# Altium schematic symbol library Centralize.SchLib: 1081 symbols (part 25 of 26)
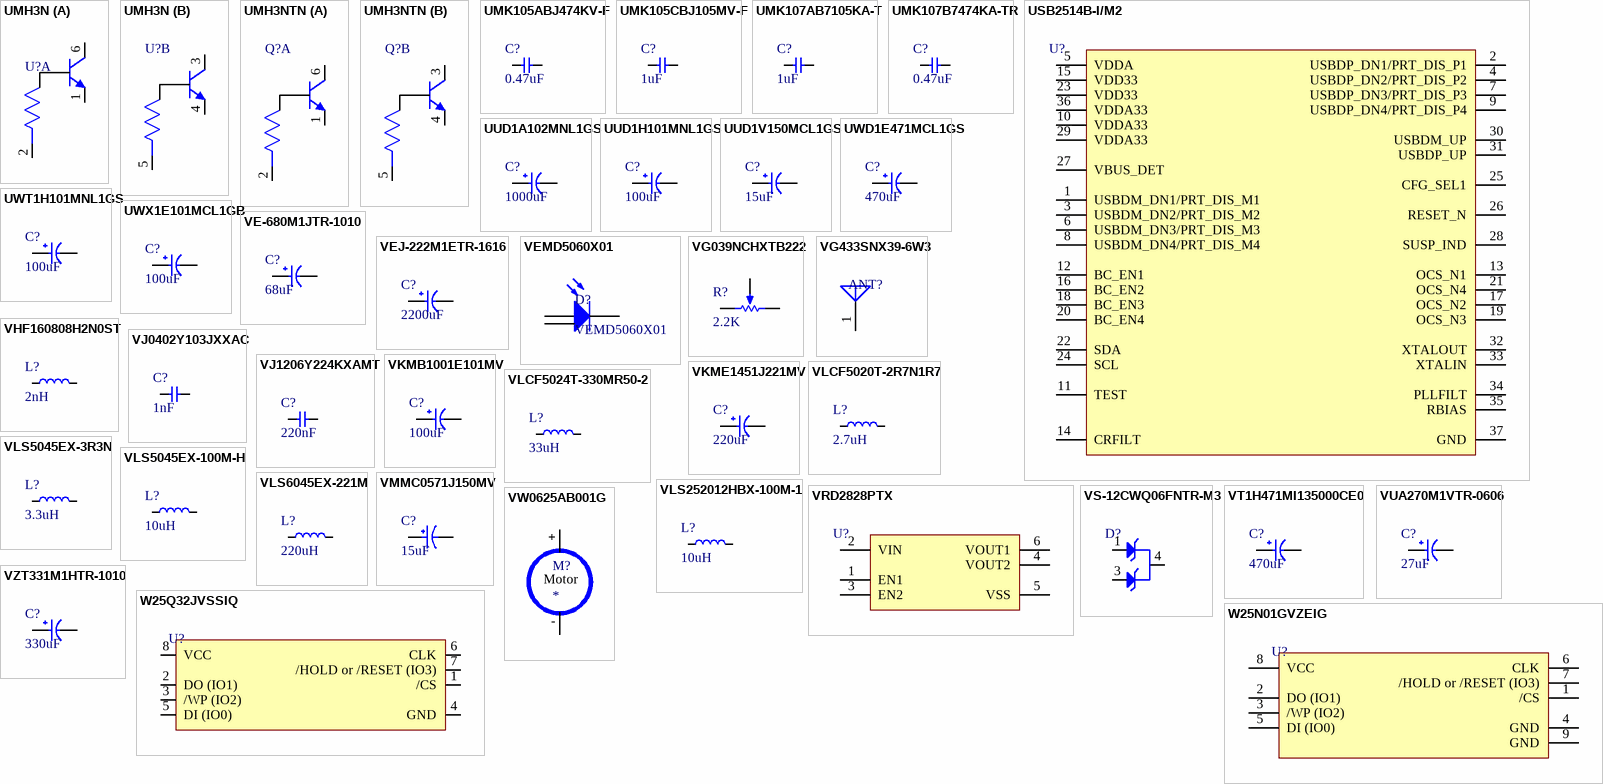
[diagram p71: symbols UMH3N to W25Q32JVSSIQ]

## VS-12CWQ06FNTR-M3
designator D?
Schottky Rectifier, 60 V, 12 A, Dual Common Cathode, TO-252AA; Manufacturer: Vishay Semiconductors; Manufacturer Part Number: VS-12CWQ06FNTR-M3; Forward Voltage: 790mV; Forward Current: 12A; Max Reverse Current: 3mA; Average Rectified Current: 6A; Max Repetitive Reverse Voltage (Vrrm): 60V; Peak Non-Repetitive Surge Current: 320A; Item Type: Rectifier Diode; Supplier 1: Avnet; RoHS: Yes; Category: Rectifier Diodes; Stock 1: 119; Pricing 1: 1=1.14000, 10=1.03000, 25=0.97800, 50=0.92000, 100=0.86500, 250=0.81400, 500=0.77000 (USD); Mount: Surface Mount; Case/Package: TO-252AA; Number of Pins: 3; Min Operating Temperature: -55°C; Max Operating Temperature: 150°C; Packaging: Tape and Reel; Element Configuration: Common Cathode; Max Forward Surge Current (Ifsm): 320A; Max Reverse Voltage (DC): 60V; Series: -; REACH SVHC: No SVHC; RoHS Compliant: Yes; ComponentLink1URL: https://datasheet.ciiva.com/8289/12cwq06f-8289149.pdf?src-supplier=Avnet; ComponentLink1Description: https://datasheet.ciiva.com/8289/12cwq06f-8289149.pdf?src-supplier=Avnet; Supplier Part Number 1: 99Y8339; LCSC Part Number: C467004
footprint TO-252AA
pins: 1 ANODE, 3 ANODE, 4 CATHODE

## VT1H471MI135000CE0
designator C?, comment 470uF
470uF ±20% 50V 12.5mm 13.5mm SMD,12.5x13.5mm; Manufacturer: Changzhou Huawei Elec; Manufacturer Part Number: VT1H471MI135000CE0; Lifetime @ Temp: 1000hrs 105℃; Item Type: Capacitor; Package: SMD,12.5x13.5mm; Capacitance: 470uF; Tolerance: ±20%; Rated Voltage: 50V; φD: 12.5mm; L: 13.5mm; Operating Temperature: -40℃~+105℃; LCSC Part Number: C191227; ComponentLink1Description: LCSC; ComponentLink1URL: https://lcsc.com/product-detail/Aluminum-Electrolytic-Capacitors-SMD_Changzhou-Huawei-Elec-VT1H471MI135000CE0_C191227.html
footprint VT1H471MI135000CE0 (470uF ±20% 50V 12.5mm 13.5mm 1000hrs 105? -40?~+105? SMD,12.5x13.5mm Aluminum Electrolytic Capacitors - SMD RoHS)
pins: 1, 2

## VUA270M1VTR-0606
designator C?, comment 27uF
27uF 35V ±20% SMD,D6.3xL5.7mm Aluminum Electrolytic Capacitors - SMD ROHS; Manufacturer: Lelon; Manufacturer Part Number: VUA270M1VTR-0606; Package: SMD,D6.3xL5.7mm; LCSC Part Number: C249807; Item Type: Capacitor; ComponentLink1Description: LCSC; ComponentLink1URL: https://www.lcsc.com/product-detail/Aluminum-Electrolytic-Capacitors-SMD_Lelon-VUA270M1VTR-0606_C249807.html
footprint VUA270M1VTR-0606
pins: 1, 2

## VW0625AB001G
designator M?
Brushless (BLDC) DC Motor Vibration, ERM 15000 RPM 3VDC; Manufacturer: Vybronics Inc; Mnaufacturer Part Number: VW0625AB001G; Item Type: Brushless DC Motor; Package: SMD, THT
footprint VW0625AB001G
pins: 1 +, 2 -
text: Motor

## VZT331M1HTR-1010
designator C?, comment 330uF
VZT Series 50 V 330 uF 105°C 10 x 10 mm SMT Aluminum Electrolytic Capacitor; Manufacturer: Surge Components; Manufacturer Part Number: VZT331M1HTR-1010S; Supplier 1: Future Electronics; RoHS: Yes; Stock 1: 35000; Pricing 1: 500=0.28000, 1500=0.27000, 2000=0.26500, 5000=0.26000, 7500=0.25000 (USD); Lead Free: Lead Free; Supplier Part Number 1: 8161943; LCSC Part Number: C249985; ComponentLink1Description: LCSC; ComponentLink1URL: https://www.lcsc.com/product-detail/Aluminum-Electrolytic-Capacitors-SMD_Lelon-VZT331M1HTR-1010_C249985.html; Item Type: Capacitor
footprint VZT-330uF-10mmDia
pins: 1, 2

## W25N01GVZEIG
designator U?
IC FLASH 1GBIT SPI/QUAD 8WSON; Manufacturer: Winbond; Manufacturer Part Number: W25N01GVZEIG; Interface: SPI,Serial; Memory Type: NAND; Density: 1Gb; Max Supply Voltage: 3.6V; Min Supply Voltage: 2.7V; Operating Supply Voltage: 3.3V; Page Size: 2Kb; Access Time: 7ns; Supplier 1: Arrow Electronics; RoHS: Yes; Category: Flash; Stock 1: 128; Pricing 1: 1=3.40000, 10=3.05600, 25=2.92700, 100=2.67700, 252=2.58500, 504=2.46500, 1008=2.40800, 2520=2.26600, 5040=2.24300 (USD); Mount: Surface Mount; Number of Pins: 8; Min Operating Temperature: -40°C; Max Operating Temperature: 85°C; RoHS Compliant: Yes; Lead Free: Lead Free; Supplier Part Number 1: W25N01GVZEIG; LCSC Part Number: C907680; Item Type: IC; ComponentLink1Description: LCSC; ComponentLink1URL: https://www.lcsc.com/product-detail/NAND-FLASH_Winbond-Elec-W25N01GVZEIG_C907680.html
footprint 8-WSON (8x6)
pins: 1 /CS, 2 DO (IO1), 3 /WP (IO2), 4 GND, 5 DI (IO0), 6 CLK, 7 /HOLD or /RESET (IO3), 8 VCC, 9 GND

## W25Q32JVSSIQ
designator U?
IC FLASH 32MBIT 133MHZ 8SOP; Manufacturer: Winbond; Manufacturer Part Number: W25Q32JVSSIQ; Memory Format: Non-Volatile,FLASH,NOR; Interface: SPI,Serial; Memory Size: 32Mb; Operating Supply Voltage: 3V; Page Size: 256B; Supplier: Arrow Electronics; Supplier Part Number: W25Q32JVSSIQ; RoHS: Yes; Category: Flash; Stock: 8474; Pricing: 1=0.6837, 25=0.5896, 100=0.5874, 500=0.5233, 5000=0.5007 (USD); Mounting Technology: Surface Mount; Case/Package: SOIC; Pins: 8; Min Operating Temperature: -40°C; Max Operating Temperature: 85°C; Packaging: Rail/Tube; Frequency: 133MHz; Series: SpiFlash®; Density: 32Mb; RoHS Compliant: Yes; ComponentLink1URL: http://www.winbond.com/resource-files/w25q32jv%20revg%2003272018%20plus.pdf?src-supplier=Digi-Key; ComponentLink1Description: http://www.winbond.com/resource-files/w25q32jv%20revg%2003272018%20plus.pdf?src-supplier=Digi-Key; ComponentLink2URL: https://www.winbond.com/hq/product/code-storage-flash-memory/serial-nor-flash/?__locale=en&partNo=W25Q32JV&src-supplier=Avnet; ComponentLink2Description: https://www.winbond.com/hq/product/code-storage-flash-memory/serial-nor-flash/?__locale=en&partNo=W25Q32JV&src-supplier=Avnet; LCSC Part Number: C82344; Item Type: IC
footprint SOIC-8 (208 mil)
pins: 1 /CS, 2 DO (IO1), 3 /WP (IO2), 4 GND, 5 DI (IO0), 6 CLK, 7 /HOLD or /RESET (IO3), 8 VCC

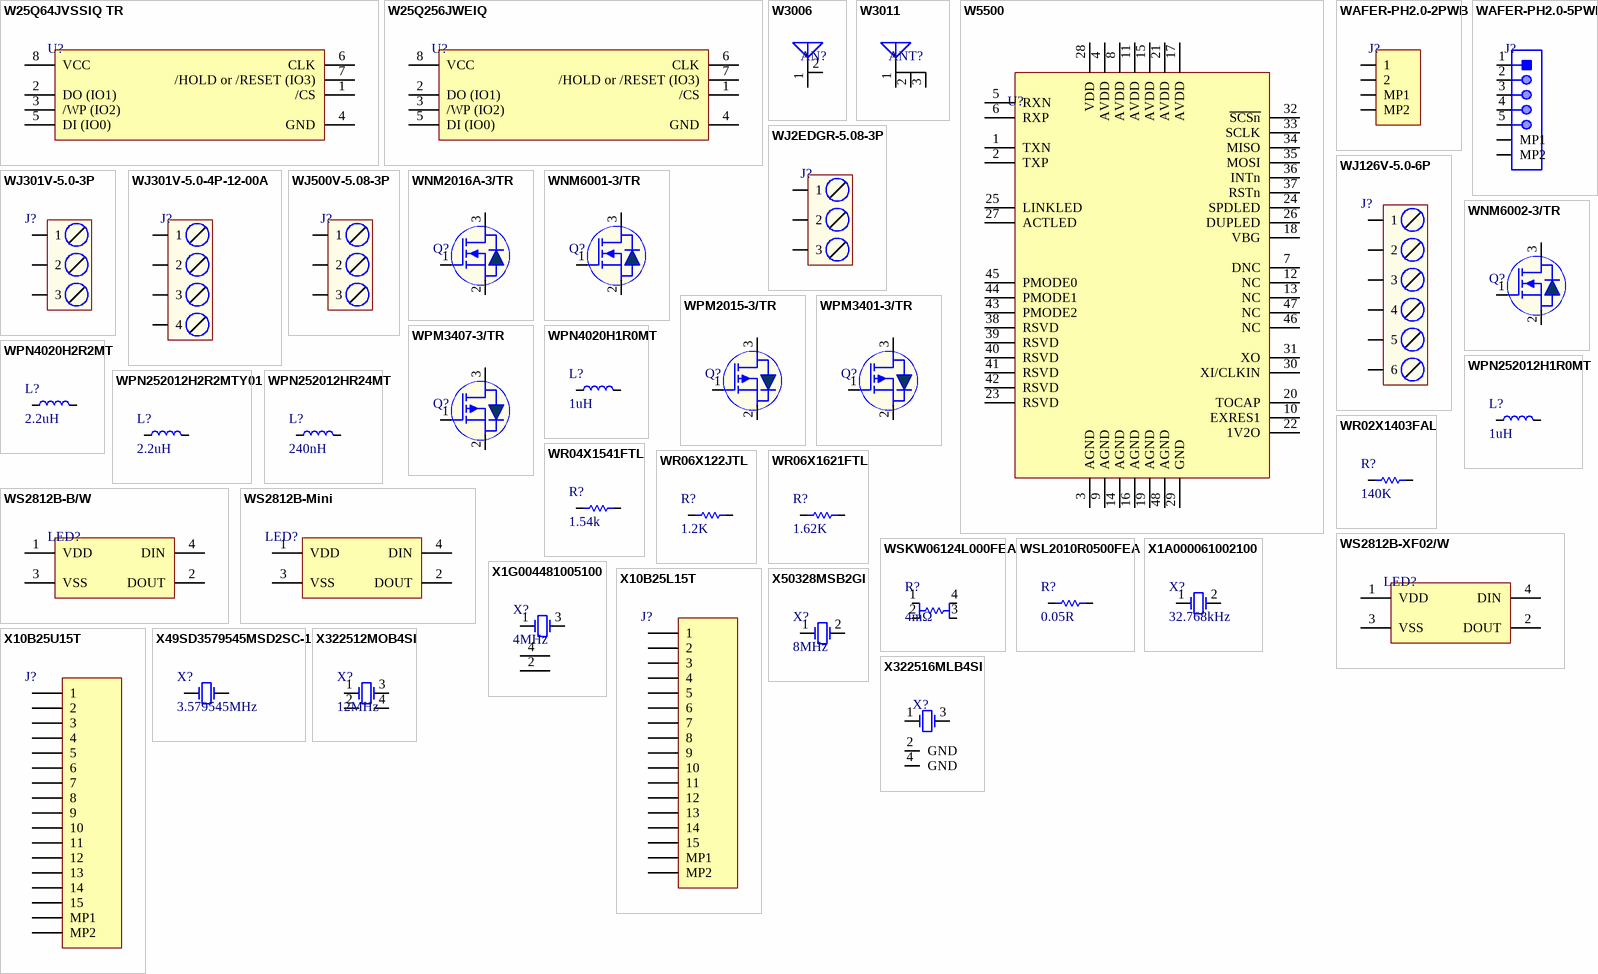
[diagram p45: symbols W25Q64JVSSIQ TR to X322516MLB4SI]

## W25Q64JVSSIQ TR
designator U?
IC FLASH 64M SPI 133MHZ 8SOIC; Manufacturer: Winbond; Manufacturer Part Number: W25Q64JVSSIQ TR; Memory Format: FLASH,NOR; Interface: SPI,Serial; Supplier 1: Arrow Electronics; RoHS: Yes; Category: Memory; Stock 1: 56000; Pricing 1: 2000=0.8199, 4000=0.7715, 6000=0.7637, 10000=0.7635 (USD); Case/Package: SOIC; Min Operating Temperature: -40°C; Max Operating Temperature: 85°C; Packaging: Tape and Reel; Series: SpiFlash®; ComponentLink1URL: http://www.winbond.com/resource-files/w25q64jv%20spi%20%20%20revc%2006032016%20kms.pdf?src-supplier=Digi-Key; ComponentLink1Description: http://www.winbond.com/resource-files/w25q64jv%20spi%20%20%20revc%2006032016%20kms.pdf?src-supplier=Digi-Key; ComponentLink2URL: http://www.winbond.com/resource-files/w25q64jv%20revj%2003272018%20plus.pdf?src-supplier=Digi-Key; ComponentLink2Description: http://www.winbond.com/resource-files/w25q64jv%20revj%2003272018%20plus.pdf?src-supplier=Digi-Key; Supplier Part Number 1: W25Q64JVSSIQ TR; LCSC Part Number: C179171; Item Type: IC
footprint SOIC-8 (208 mil)
pins: 1 /CS, 2 DO (IO1), 3 /WP (IO2), 4 GND, 5 DI (IO0), 6 CLK, 7 /HOLD or /RESET (IO3), 8 VCC

## W25Q256JWEIQ
designator U?
IC FLASH 256MBIT SPI/QUAD 8WSON; Manufacturer: Winbond; Manufacturer Part Number: W25Q256JWEIQ; Supplier 1: Arrow Electronics; RoHS: Yes; Category: Memory; RoHS Compliant: Yes; Supplier Part Number 1: W25Q256JWEIQ; ComponentLink1Description: LCSC; ComponentLink1URL: https://www.lcsc.com/product-detail/NOR-FLASH_Winbond-Elec-W25Q256JWEIQ_C2980994.html; LCSC Part Number: C2980994; Item Type: IC
footprint 8-WSON 6x5-mm
pins: 1 /CS, 2 DO (IO1), 3 /WP (IO2), 4 GND, 5 DI (IO0), 6 CLK, 7 /HOLD or /RESET (IO3), 8 VCC

## W3006
designator AN?
RF ANT 2.4GHZ/5.5GHZ CHIP SLD; Manufacturer: Pulse; Manufacturer Part Number: W3006; Number of Bands: 2; Return Loss: -10dB; Frequency: 5GHz; Impedance: 50R; Max Frequency: 5.85GHz; Min Frequency: 2.4GHz; Item Type: Antenna; Supplier 1: Arrow Electronics; RoHS: Yes; Category: RF Antennas; Stock 1: 3000; Pricing 1: 1000=1.00560, 2000=0.97680 (USD); Mount: Surface Mount; Case/Package: SMD/SMT; Number of Pins: 2; Contact Plating: Tin,Matte; Min Operating Temperature: -40°C; Max Operating Temperature: 85°C; Termination: Solder; Packaging: Bulk; Package Quantity: 1; Series: -; Length: 10mm; Width: 3.2mm; Height: 0.059inch; Radiation Hardening: No; RoHS Compliant: Yes; ComponentLink1URL: https://datasheet.ciiva.com/2792/+w3006-2792242.pdf?src-supplier=Digi-Key; ComponentLink1Description: https://datasheet.ciiva.com/2792/+w3006-2792242.pdf?src-supplier=Digi-Key; ComponentLink2URL: https://datasheet.ciiva.com/4432/w3006-203400-4432372.pdf?src-supplier=Mouser; ComponentLink2Description: https://datasheet.ciiva.com/4432/w3006-203400-4432372.pdf?src-supplier=Mouser; ComponentLink3URL: https://datasheet.ciiva.com/2792/+w3006-2792243.pdf?src-supplier=Digi-Key; ComponentLink3Description: https://datasheet.ciiva.com/2792/+w3006-2792243.pdf?src-supplier=Digi-Key; ComponentLink4URL: https://datasheet.ciiva.com/2792/+w3006-2792244.pdf?src-supplier=Digi-Key; ComponentLink4Description: https://datasheet.ciiva.com/2792/+w3006-2792244.pdf?src-supplier=Digi-Key; ComponentLink5URL: https://datasheet.ciiva.com/8152/antennas-g00302-8152982.pdf?src-supplier=Avnet; ComponentLink5Description: https://datasheet.ciiva.com/8152/antennas-g00302-8152982.pdf?src-supplier=Avnet; Supplier Part Number 1: W3006
footprint W3006_
pins: 1 FEED , 2 Support Pad

## W3011
designator ANT?
RF ANT 1.575GHZ CHIP SOLDER SMD; Manufacturer: Pulse; Manufacturer Part Number: W3011; Item Type: Antenna; Frequency: 1.57542GHz; Impedance: 50R; Number of Bands: 1; Return Loss: -12dB; Clock Frequency: 1.58542GHz; Min Frequency: 1.56542GHz; Supplier 1: Digi-Key; RoHS: Yes; Category: RF Antennas; Stock 1: 9327; Pricing 1: 1=1.59, 10=1.431, 25=1.35, 100=1.1502, 250=1.08, 500=0.945, 1000=0.783 (USD); Mounting Technology: Surface Mount,PCB; Package Quantity: 3000; Termination: Solder; Packaging: Cut Tape; Series: -; Height: 0.043inch; RoHS Compliant: Yes; Lead Free: Lead Free; ComponentLink1URL: https://datasheet.ciiva.com/8152/+w3011-w3011a-8152997.pdf?src-supplier=Avnet; ComponentLink1Description: https://datasheet.ciiva.com/8152/+w3011-w3011a-8152997.pdf?src-supplier=Avnet; ComponentLink2URL: https://datasheet.ciiva.com/2792/+w3011-w3011a-2792615.pdf?src-supplier=Digi-Key; ComponentLink2Description: https://datasheet.ciiva.com/2792/+w3011-w3011a-2792615.pdf?src-supplier=Digi-Key; Supplier Part Number 1: 553-2582-1-ND
footprint W3011
pins: 1 FEED , 2 GND, 3 GND

## W5500
designator U?
SPI LQFP-48(7x7) Ethernet ICs ROHS; Manufacturer: WIZNET; Manufacturer Part Number: W5500; Item Type: IC; LCSC Part Number: C32843; Package: LQFP-48(7x7); ComponentLink1Description: LCSC; ComponentLink1URL: https://www.lcsc.com/product-detail/Ethernet-ICs_WIZNET-W5500_C32843.html
footprint 48-LQFP (7x7)_
pins: 1 TXN, 2 TXP, 3 AGND, 4 AVDD, 5 RXN, 6 RXP, 7 DNC, 8 AVDD, 9 AGND, 10 EXRES1, 11 AVDD, 12 NC, 13 NC, 14 AGND, 15 AVDD, 16 AGND, 17 AVDD, 18 VBG, 19 AGND, 20 TOCAP, 21 AVDD, 22 1V2O, 23 RSVD, 24 SPDLED, 25 LINKLED, 26 DUPLED, 27 ACTLED, 28 VDD, 29 GND, 30 XI/CLKIN, 31 XO, 32 ~{SCSn}, 33 SCLK, 34 MISO, 35 MOSI, 36 INTn, 37 RSTn, 38 RSVD, 39 RSVD, 40 RSVD, 41 RSVD, 42 RSVD, 43 PMODE2, 44 PMODE1, 45 PMODE0, 46 NC, 47 NC, 48 AGND

## WAFER-PH2.0-2PWB
designator J?
1x2P 1 2mm Male pin 2 -25℃~+85℃ 2A Surface Mount SMD,P=2mm Wire To Board / Wire To Wire Connector ROHS; Manufacturer: XUNPU; Manufacturer Part Number: WAFER-PH2.0-2PWB; Item Type: Right Angle JST; Package: SMD,P=2mm; LCSC Part Number: C3029440; ComponentLink1Description: LCSC; ComponentLink1URL: https://www.lcsc.com/product-detail/Wire-To-Board-Wire-To-Wire-Connector_XUNPU-WAFER-PH2-0-2PWB_C3029440.html
footprint WAFER-PH2.0-2PWB
pins: 1, 2, MP1, MP2

## WAFER-PH2.0-5PWB
designator J?
1x5P 1 2mm Male pin 5 -25℃~+85℃ 2A Surface Mount SMD,P=2mm Wire To Board / Wire To Wire Connector ROHS; Manufacturer: XUNPU; Manufacturer Part Number: WAFER-PH2.0-5PWB; Item Type: Wire To Board Connector; Package: SMD,P=2mm; LCSC Part Number: C3029443; ComponentLink1Description: LCSC; ComponentLink1URL: https://www.lcsc.com/product-detail/Wire-To-Board-Wire-To-Wire-Connector_XUNPU-WAFER-PH2-0-5PWB_C3029443.html
footprint WAFER-PH2.0-5PWB
pins: 1, 2, 3, 4, 5, MP1, MP2

## WJ2EDGR-5.08-3P
designator J?
3 Bend 1 5.08mm Green Board Edge/Receptacle-Open Push-Pull,P=5.08mm Pluggable System Terminal Block ROHS; Manufacturer: Ningbo Kangnex Elec; Manufacturer Part Number: WJ2EDGR-5.08-3P; Package: Push-Pull,P=5.08mm; LCSC Part Number: C70914; Item Type: Terminal Block; ComponentLink1Description: LCSC; ComponentLink1URL: https://www.lcsc.com/product-detail/Pluggable-System-span-style-background-color-ff0-Terminal-span-Block_Ningbo-Kangnex-Elec-WJ2EDGR-5-08-3P_C70914.html
footprint WJ2EDGR-5.08-3P_
pins: 1, 2, 3

## WJ126V-5.0-6P
designator J?
P=5.0mm Screw terminal ROHS; Manufacturer: Ningbo Kangnex Elec; Manufacturer Part Number: WJ126V-5.0-6P; Item Type: Terminal Block; Package: Custom; ComponentLink1Description: LCSC; ComponentLink1URL: https://www.lcsc.com/product-detail/Screw-span-style-background-color-ff0-terminal-span_Ningbo-Kangnex-Elec-WJ126V-5-0-6P_C8379.html; LCSC Part Number: C8379
footprint WJ126V-5.0-6P_
pins: 1, 2, 3, 4, 5, 6

## WJ301V-5.0-3P
designator J?
P=5.0mm Screw terminal RoHS; Manufacturer: Ningbo Kangnex Elec; Manufacturer Part Number: WJ301V-5.0-3P; Item Type: Terminal Block; Package: Custom; LCSC Part Number: C8483; ComponentLink1Description: LCSC; ComponentLink1URL: https://www.lcsc.com/product-detail/Screw-terminal_Ningbo-Kangnex-Elec-WJ301V-5-0-3P_C8483.html
footprint WJ301V-5.0-3P
pins: 1, 2, 3

## WJ301V-5.0-4P-12-00A
designator J?
Plugin,P=5mm Screw terminal ROHS; Manufacturer: Ningbo Kangnex Elec; Manufacturer Part Number: WJ301V-5.0-4P-12-00A; Item Type: Terminal Block; Package: Plugin,P=5mm; LCSC Part Number: C3031442; ComponentLink1Description: LCSC; ComponentLink1URL: https://www.lcsc.com/product-detail/Screw-terminal_Ningbo-Kangnex-Elec-WJ301V-5-0-4P-12-00A_C3031442.html
footprint WJ301V-5.0-4P-12-00A
pins: 1, 2, 3, 4

## WJ500V-5.08-3P
designator J?
1x3P 18A -40℃~+105℃ 250V Green 14~30 Straight pin 5.08mm 2.5 1 3 Plugin,P=5.08mm Screw terminal ROHS; Manufacturer: Ningbo Kangnex Elec; Manufacturer Part Number: WJ500V-5.08-3P; Item Type: Terminal Block; Package: Plugin,P=5.08mm; LCSC Part Number: C72334; ComponentLink1Description: LCSC; ComponentLink1URL: https://www.lcsc.com/product-detail/Screw-terminal_Ningbo-Kangnex-Elec-WJ500V-5-08-3P_C72334.html
footprint WJ500V-5.08-3P
pins: 1, 2, 3

## WNM2016A-3/TR
designator Q?
Single N-Channel, 20V, 4.7A, Power MOSFET; Manufacturer: WILLSEMI; Manufacturer Part Number: WNM2016A-3/TR; Footprint: SOT-23-3; ComponentLink1Description: LCSC; ComponentLink1URL: https://www.lcsc.com/product-detail/MOSFETs_WILLSEMI-Will-Semicon-WNM2016A-3-TR_C601105.html; LCSC Part Number: C601105; Item Type: Mosfet
footprint sot-23
pins: 1 G, 2 S, 3 D

## WNM6001-3/TR
designator Q?
60V 500mA 690mW 2Ω@10V,500mA 2V@250uA N Channel SOT-23 MOSFETs ROHS; Manufacturer: WILLSEMI; Manufacturer Part Number: WNM6001-3/TR; Item Type: Mosfet; ComponentLink1Description: LCSC; ComponentLink1URL: https://www.lcsc.com/product-detail/MOSFETs_WILLSEMI-Will-Semicon-WNM6001-3-TR_C239589.html; Footprint: SOT-23; LCSC Part Number: C239589
footprint SOT-23 (TRANS NPN 40V 0.6A SOT23)
pins: 1 G, 2 S, 3 D

## WNM6002-3/TR
designator Q?
60V 300mA 2Ω@10V,370mA 370mW 2V@250uA N Channel SOT-323 MOSFETs ROHS; Manufacturer: WILLSEMI; Manufacturer Part Number: WNM6002-3/TR; Item Type: Mosfet; ComponentLink1Description: LCSC; ComponentLink1URL: https://www.lcsc.com/product-detail/MOSFETs_WILLSEMI-Will-Semicon-WNM6002-3-TR_C501342.html; Package: SOT-323; LCSC Part Number: C501342
footprint SOT_323
pins: 1 G, 2 S, 3 D

## WPM2015-3/TR
designator Q?
20V 2.2A 800mW 110mΩ@4.5V,2.7A 810mV@250uA P Channel SOT-23 MOSFETs ROHS; Manufacturer: WILLSEMI; Manufacturer Part Number: WPM2015-3/TR; Item Type: Mosfet; Package: SOT-23; LCSC Part Number: C213159; ComponentLink1Description: LCSC; ComponentLink1URL: https://www.lcsc.com/product-detail/MOSFETs_WILLSEMI-Will-Semicon-WPM2015-3-TR_C213159.html
footprint Sot-23 (TRANS NPN 40V 0.6A SOT23)
pins: 1 G, 2 S, 3 D

## WPM3401-3/TR
designator Q?
30V 4.6A 38mΩ@10V,4.3A 1.3W 1V@250uA 90pF@15V P Channel 1.25nF@15V 24.8nC@10V +150℃@(Tj) SOT-23-3L MOSFETs ROHS; Manufacturer: WILLSEMI; Manufacturer Part Number: WPM3401-3/TR; Item Type: Mosfet; Footprint: SOT-23-3L; ComponentLink1Description: LCSC; ComponentLink1URL: https://www.lcsc.com/product-detail/MOSFETs_WILLSEMI-Will-Semicon-WPM3401-3-TR_C506235.html; LCSC Part Number: C506235
footprint SOT-23-3L_
pins: 1 G, 2 S, 3 D

## WPM3407-3/TR
designator Q?
30V 3.7A 46mΩ@10V,4.4A 1W 3V@250uA P Channel SOT-23(SOT-23-3) MOSFETs ROHS; Manufacturer Part Number: WPM3407-3/TR; Manufacturer: WILLSEMI; Item Type: Mosfet; Package: SOT-23; LCSC Part Number: C167139; ComponentLink1Description: LCSC; ComponentLink1URL: https://www.lcsc.com/product-detail/MOSFETs_WILLSEMI-Will-Semicon-WPM3407-3-TR_C167139.html
footprint Sot-23 (TRANS NPN 40V 0.6A SOT23)
pins: 1 G, 2 S, 3 D

## WPN4020H1R0MT
designator L?, comment 1uH
FIXED IND 1UH 5.8A 26 MOHM SMD; Manufacturer: Sunlord; Manufacturer Part Number: WPN4020H1R0MT; Item Type: Inductor; Supplier 1: Digi-Key; RoHS: Yes; Category: Fixed Inductors; Supplier Part Number 1: 3442-WPN4020H1R0MTTR-ND; LCSC Part Number: C98359; ComponentLink1Description: LCSC; ComponentLink1URL: https://www.lcsc.com/product-detail/Power-Inductors_Sunlord-WPN4020H1R0MT_C98359.html
footprint WPN4020H1R0MT_
pins: 1, 2

## WPN4020H2R2MT
designator L?, comment 2.2uH
Fixed Ind 2.2UH 4.3A 48MOHM SMD; Manufacturer: Sunlord; Manufacturer Part Number: WPN4020H2R2MT; Item Type: Inductor; Supplier 1: Digi-Key; RoHS: No; Stock 1: 1762; Pricing 1: 1=0.84000, 10=0.73500, 25=0.68240, 50=0.57760, 100=0.52500, 250=0.49352, 500=0.44100, 1000=0.35700 (USD); Supplier Part Number 1: 3442-WPN4020H2R2MTCT-ND; LCSC Part Number: C98361; ComponentLink1Description: LCSC; ComponentLink1URL: https://www.lcsc.com/product-detail/Power-Inductors_Sunlord-WPN4020H2R2MT_C98361.html
footprint WPN4020H2R2MT_ ((4.00mm x 4.00mm))
pins: 1, 2

## WPN252012H1R0MT
designator L?, comment 1uH
FIXED IND 1UH 3A 54 MOHM SMD; Manufacturer: Sunlord; Manufacturer Part Number: WPN252012H1R0MT; Item Type: Inductor; Supplier 1: Digi-Key; RoHS: Yes; Category: Fixed Inductors; Stock 1: 4813; Pricing 1: 1=0.46000, 10=0.40400, 25=0.37520, 50=0.31760, 100=0.28880, 250=0.27144, 500=0.24256, 1000=0.19635 (USD); Supplier Part Number 1: 3442-WPN252012H1R0MTCT-ND; LCSC Part Number: C98348; ComponentLink1Description: LCSC; ComponentLink1URL: https://www.lcsc.com/product-detail/Power-Inductors_Sunlord-WPN252012H1R0MT_C98348.html
footprint WPN252012H1R0MT_
pins: 1, 2

## WPN252012H2R2MTY01
designator L?, comment 2.2uH
Fixed Ind 2.220%UH 0.085 Ohm 2700; Manufacturer: Sunlord; Manufacturer Part Number: WPN252012H2R2MTY01; Item Type: Inductor; Supplier 1: Digi-Key; RoHS: Yes; Category: Fixed Inductors; Stock 1: 1965; Pricing 1: 1=0.46000, 10=0.40400, 25=0.37520, 50=0.31760, 100=0.28880, 250=0.27144, 500=0.24256, 1000=0.19635 (USD); Supplier Part Number 1: 3442-WPN252012H2R2MTY01CT-ND; ComponentLink1Description: LCSC; ComponentLink1URL: https://www.lcsc.com/product-detail/Power-Inductors_Sunlord-WPN252012H2R2MTY01_C279858.html; LCSC Part Number: C279858
footprint Inductor 1008
pins: 1, 2

## WPN252012HR24MT
designator L?, comment 240nH
4.05A 240nH ±20% 19mΩ SMD Power Inductors ROHS; Manufacturer: Sunlord; Manufacturer Part Number: WPN252012HR24MT; Footprint: Custom; ComponentLink1Description: LCSC; ComponentLink1URL: https://www.lcsc.com/product-detail/Power-Inductors_Sunlord-WPN252012HR24MT_C305274.html; LCSC Part Number: C305274; Item Type: Inductor
footprint WPN252012HR24MT_
pins: 1, 2

## WR02X1403FAL
designator R?, comment 140K
Res 140K Ohm 1% 1/20W 0201; Manufacturer: Walsin Technologies; Manufacturer Part Number: WR02X1403FAL; Item Type: Resistor; Supplier 1: Digi-Key; RoHS: Yes; Category: Chip SMD Resistors; Pricing 1: 15000=0.00192 (USD); RoHS Compliant: Yes; Supplier Part Number 1: 1292-WR02X1403FALTR-ND; LCSC Part Number: C367500
footprint Res-0201
pins: 1, 2

## WR04X1541FTL
designator R?, comment 1.54k
62.5mW Thick Film Resistors ±1% 1.54kΩ 0402 Chip Resistor - Surface Mount ROHS; Manufacturer: Walsin Tech Corp; Manufacturer Part Number: WR04X1541FTL; LCSC Part Number: C396136; Package: 0402; Item Type: Resistor; ComponentLink1Description: LCSC; ComponentLink1URL: https://www.lcsc.com/product-detail/Chip-Resistor-Surface-Mount_Walsin-Tech-Corp-WR04X1541FTL_C396136.html
footprint Res-0402
pins: 1, 2

## WR06X122JTL
designator R?, comment 1.2K
RES 1.2K OHM 5% 1/10W 0603; Manufacturer: Walsin Technologies; Manufacturer Part Number: WR06X122JTL; Power Rating: 100mW; Voltage Rating (DC): 75V; Resistance: 1200R; Item Type: Resistor; Supplier 1: Arrow Electronics; RoHS: Yes; Category: Resistors; Stock 1: 545000; Pricing 1: 5000=0.00640, 10000=0.00630, 25000=0.00620, 50000=0.00610 (USD); Case/Package: Molded; Contact Material: Tin; Packaging: Tape and Reel; Tolerance: 5%; Lead Free: Lead Free; RoHS Compliant: Yes; ComponentLink1URL: http://www.farnell.com/datasheets/1960319.pdf?src-supplier=Farnell; ComponentLink1Description: http://www.farnell.com/datasheets/1960319.pdf?src-supplier=Farnell; ComponentLink2URL: https://www.verical.com/server-webapp/html/getDatasheet?partID=752938&src-supplier=Verical; ComponentLink2Description: https://www.verical.com/server-webapp/html/getDatasheet?partID=752938&src-supplier=Verical; Supplier Part Number 1: WR06X122 JTL; LCSC Part Number: C168366
footprint Res-0603
pins: 1, 2

## WR06X1621FTL
designator R?, comment 1.62K
RES 1.62K OHM 1% 1/10W 0603; Manufacturer: Walsin Technologies; Manufacturer Part Number: WR06X1621FTL; Power Rating: 100mW; Resistance: 1.62kR; Item Type: Resistor; Supplier 1: Arrow Electronics; RoHS: Yes; Category: Chip SMD Resistors; Stock 1: 145000; Pricing 1: 5000=0.00100 (USD); Case/Package: Molded; Contact Material: Tin; Lead Free: Lead Free; RoHS Compliant: Yes; Supplier Part Number 1: WR06X1621FTL; LCSC Part Number: C170482; ComponentLink1Description: LCSC; ComponentLink1URL: https://www.lcsc.com/product-detail/Chip-Resistor-Surface-Mount_Walsin-Tech-Corp-WR06X1621FTL_C170482.html
footprint Res-0603
pins: 1, 2

## WS2812B-B/W
designator LED?
RGB SMD5050 Light Emitting Diodes (LED) ROHS; Manufacturer: Worldsemi; Manufacturer Part Number: WS2812B-B/W; Item Type: RGB LED; Package: SMD5050; LCSC Part Number: C114586; ComponentLink1Description: LCSC; ComponentLink1URL: https://www.lcsc.com/product-detail/Light-Emitting-Diodes-LED_Worldsemi-WS2812B-B-W_C114586.html
footprint WS2812B-B/W
pins: 1 VDD, 2 DOUT, 3 VSS, 4 DIN

## WS2812B-Mini
designator LED?
SMD,3.5x3.5mm Light Emitting Diodes (LED) RoHS; Manufacturer: Worldsemi; Manufacturer Part Number: WS2812B-Mini; Item Type: RGB LED; ComponentLink1Description: LCSC; ComponentLink1URL: *https://lcsc.com/product-detail/Light-Emitting-Diodes-LED_Worldsemi-WS2812B-Mini_C527089.html; Package: SMD,3.5x3.5mm; LCSC Part Number: C527089
footprint WS2812B-Mini (SMD,3.5x3.5mm Light Emitting Diodes (LED) RoHS)
pins: 1 VDD, 2 DOUT, 3 VSS, 4 DIN

## WS2812B-XF02/W
designator LED?
SMD5050 Light Emitting Diodes (LED) ROHS; Manufacturer: Worldsemi; Manufacturer Part Number: WS2812B-XF02/W; Item Type: RGB LED; Package: SMD5050; LCSC Part Number: C4154882; ComponentLink1Description: LCSC; ComponentLink1URL: https://www.lcsc.com/product-detail/Light-Emitting-Diodes-LED_Worldsemi-WS2812B-XF02-W_C4154882.html
footprint WS2812B-XF02/W
pins: 1 VDD, 2 DOUT, 3 VSS, 4 DIN

## WSKW06124L000FEA
designator R?, comment 4mΩ
1W ±75ppm/℃ ±1% 4mΩ -65℃~+170℃ 0612 Chip Resistor - Surface Mount ROHS; Manufacturer: Vishay; Manufacturer Part Number: WSKW06124L000FEA; Supplier 1: Digi-Key; RoHS: Yes; Category: Chip SMD Resistors; Supplier Part Number 1: 541-WSKW06124L000FEACT-ND; LCSC Part Number: C4017878; Item Type: Resistor; ComponentLink1Description: LCSC; ComponentLink1URL: https://lcsc.com/product-detail/Chip-Resistor-Surface-Mount_Vishay-Intertech-WSKW06124L000FEA_C4017878.html
footprint Res 0612
pins: 1, 2, 3, 4

## WSL2010R0500FEA
designator R?, comment 0.05R
RES 0.05 OHM 1% 1/2W 2010; Manufacturer: Vishay Dale; Manufacturer Part Number: WSL2010R0500FEA; Temperature Coefficient: 75ppm/°C; Resistance: 50mR; Power Rating: 500mW; Voltage Rating: 150mV; Item Type: Resistor; Supplier 1: Digi-Key; RoHS: No; Category: Chip SMD Resistors; Stock 1: 20000; Pricing 1: 1=0.92000, 10=0.81400, 25=0.74800, 50=0.68240, 100=0.59060, 250=0.49876, 500=0.42000, 1000=0.35000 (USD); Mount: Surface Mount; Case/Package: 2010; Number of Pins: 2; Contact Plating: Tin,Matte; Weight: 0.001372oz; Case Code (Metric): 5025; Case Code (Imperial): 2010; Min Operating Temperature: -65°C; Max Operating Temperature: 170°C; Resistor Type: Metal Element,Metal Strip; Tolerance: 1%; Features: Moisture Resistant; Number of Terminations: 2; Termination: SMD/SMT; Max Power Dissipation: 500mW; Package Quantity: 1; Packaging: Tape and Reel; Length: 5.08mm; Width: 0.1inch; Height: 0.635mm; Depth: 2.54mm; Radiation Hardening: No; REACH SVHC: No SVHC; Military Standard: Not; Lead Free: Lead Free; ComponentLink1URL: https://datasheet.ciiva.com/2483/wsl-2483729.pdf?src-supplier=Digi-Key; ComponentLink1Description: https://datasheet.ciiva.com/2483/wsl-2483729.pdf?src-supplier=Digi-Key; ComponentLink2URL: https://datasheet.ciiva.com/2483/wsl-2483730.pdf?src-supplier=Digi-Key; ComponentLink2Description: https://datasheet.ciiva.com/2483/wsl-2483730.pdf?src-supplier=Digi-Key; ComponentLink3URL: https://datasheet.ciiva.com/2483/wsl-2483731.pdf?src-supplier=Digi-Key; ComponentLink3Description: https://datasheet.ciiva.com/2483/wsl-2483731.pdf?src-supplier=Digi-Key; ComponentLink4URL: https://datasheet.ciiva.com/7695/wsl-7695158.pdf?src-supplier=Element14; ComponentLink4Description: https://datasheet.ciiva.com/7695/wsl-7695158.pdf?src-supplier=Element14; ComponentLink5URL: https://datasheet.ciiva.com/16215/wsl-16215947.pdf?src-supplier=Future+Electronics; ComponentLink5Description: https://datasheet.ciiva.com/16215/wsl-16215947.pdf?src-supplier=Future+Electronics; ComponentLink6URL: https://datasheet.ciiva.com/17177/wsl-17177243.pdf?src-supplier=Avnet+Europe; ComponentLink6Description: https://datasheet.ciiva.com/17177/wsl-17177243.pdf?src-supplier=Avnet+Europe; ComponentLink7URL: https://datasheet.ciiva.com/28621/1911169-28621837.pdf?src-supplier=Element14; ComponentLink7Description: https://datasheet.ciiva.com/28621/1911169-28621837.pdf?src-supplier=Element14; ComponentLink8URL: https://datasheet.ciiva.com/36857/442550-36857725.pdf?src-supplier=Element14; ComponentLink8Description: https://datasheet.ciiva.com/36857/442550-36857725.pdf?src-supplier=Element14; Supplier Part Number 1: WSLE-.05CT-ND; LCSC Part Number: C844689
footprint RES-2010
pins: 1, 2

## X1A000061002100
designator X?, comment 32.768kHz
32.768kHz SMD Crystal Resonator 6pF 90kΩ ±20ppm -40℃~+85℃ SMD2012-2P Crystals ROHS; Manufacturer Part Number: X1A000061002100; Manufacturer: Seiko Epson; ComponentLink1Description: LCSC; ComponentLink1URL: https://www.lcsc.com/product-detail/Crystals_Seiko-Epson-X1A000061002100_C255767.html; Value: 32.768kHz; LCSC Part Number: C255767; Item Type: Crystal
footprint X1A000061002100_
pins: 1 OSC1, 2 OSC2

## X1G004481005100
designator X?, comment 4MHz
4MHz ±100ppm 3mA 1.6V ~ 3.6V SMD7050-4P Oscillators ROHS; Manufacturer: Seiko; Manufacturer Part Number: X1G004481005100; Item Type: Crystal; Package: Custom; ComponentLink1Description: LCSC; ComponentLink1URL: https://lcsc.com/product-detail/Oscillators_Seiko-Epson-X1G004481005100_C70511.html; LCSC Part Number: C70511
footprint X1G004481005100_
pins: 1 OSC1, 2 GND, 3 OSC2, 4 VCC

## X10B25L15T
designator J?
Slide Lock 15 Bottom Contact Surface Mount 1mm 260℃ SMD,P=1mm FFC/FPC Connectors ROHS; Manufacturer: XKB Connectivity; Manufacturer Part Number: X10B25L15T; Item Type: FFC Connector; Package: Custom; LCSC Part Number: C500174; ComponentLink1Description: LCSC; ComponentLink1URL: https://www.lcsc.com/product-detail/FFC-FPC-Connectors_XKB-Connectivity-X10B25L15T_C500174.html
footprint X10B25L15T_
pins: 1, 2, 3, 4, 5, 6, 7, 8, 9, 10, 11, 12, 13, 14, 15, MP1, MP2

## X10B25U15T
designator J?
Contact,Top 15 0.039"（1.00mm） 0.098"（2.50mm） Slide Lock SMD FFC, FPC Connectors RoHS; Maunfacturer Part Number: X10B25U15T; Manufacturer: XKB Connectivity; ComponentLink1Description: LCSC; ComponentLink1URL: https://www.lcsc.com/product-detail/FFC-FPC-Connectors_XKB-Connectivity-X10B25U15T_C500193.html; LCSC Part Number: C500193; Item Type: FPC Connector
footprint X10B25U15T_
pins: 1, 2, 3, 4, 5, 6, 7, 8, 9, 10, 11, 12, 13, 14, 15, MP1, MP2

## X49SD3579545MSD2SC-1
designator X?, comment 3.579545MHz
3.579545MHz 20pF ±20ppm ±30ppm HC-49S Crystals ROHS; Manufacturer: Yangxing Tech; Manufacturer Part Number: X49SD3579545MSD2SC-1; Package: HC-49S; LCSC Part Number: C2195; Item Type: Crystal; ComponentLink1Description: LCSC; ComponentLink1URL: https://www.lcsc.com/product-detail/Crystals_Yangxing-Tech-X49SD3579545MSD2SC-1_C2195.html
footprint X49SD3579545MSD2SC-1
pins: 1 OSC1, 2 OSC2

## X50328MSB2GI
designator X?, comment 8MHz
8MHz 20pF ±10ppm ±50ppm SMD5032-2P Crystals ROHS; Manufacturer: Yangxing Tech; Manufacturer Part Number: X50328MSB2GI; Package: SMD5032-2P; LCSC Part Number: C115962; Item Type: Crystal; ComponentLink1Description: LCSC; ComponentLink1URL: https://www.lcsc.com/product-detail/Crystals_Yangxing-Tech-X50328MSB2GI_C115962.html
footprint SMD5032-2P
pins: 1 OSC1, 2 OSC2

## X322512MOB4SI
designator X?, comment 12MHz
12MHz SMD Crystal Resonator 12pF ±10ppm ±30ppm -40℃~+85℃ SMD3225-4P Crystals ROHS; Manufacturer: Yangxing Tech; Manufacturer Part Number: X322512MOB4SI; ComponentLink1Description: LCSC; ComponentLink1URL: https://www.lcsc.com/product-detail/Crystals_Yangxing-Tech-X322512MOB4SI_C70565.html; Package: SMD3225-4P; LCSC Part Number: C70565; Item Type: Crystal
footprint X322512MOB4SI_
pins: 1, 2 GND, 3, 4 GND

## X322516MLB4SI
designator X?
16MHz SMD Crystal Resonator 9pF ±10ppm ±30ppm -40℃~+85℃ SMD3225-4P Crystals ROHS; Manufacturer: Yangxing Tech; Manufacturer Part Number: X322516MLB4SI; Package: SMD3225-4P; ComponentLink1Description: LCSC; ComponentLink1URL: https://www.lcsc.com/product-detail/Crystals_Yangxing-Tech-X322516MLB4SI_C13738.html; LCSC Part Number: C13738; Item Type: Crystal
footprint SMD3225-4P
pins: 1 CRYSTAL, 2 GND, 3 CRYSTAL, 4 GND

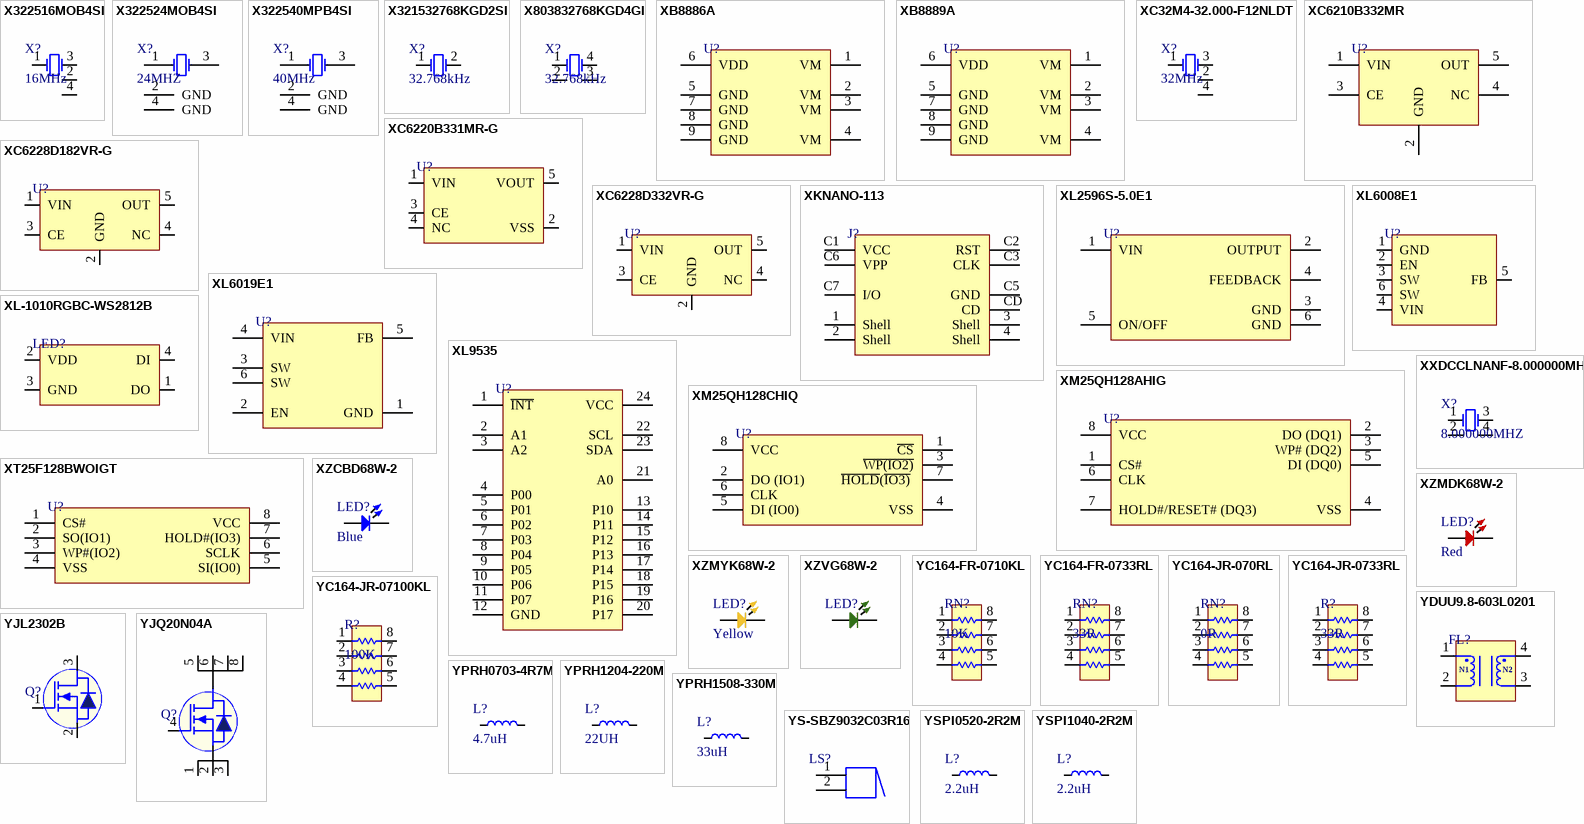
[diagram p46: symbols X322516MOB4SI to YSPI1040-2R2M]

## X322516MOB4SI
designator X?, comment 16MHz
16MHz SMD Crystal Resonator 12pF ±10ppm ±30ppm -40℃~+85℃ SMD3225-4P Crystals ROHS; Manufacturer: Yangxing Tech; Manufacturer Part Number: X322516MOB4SI; Footprint: Custom; ComponentLink1Description: LCSC; ComponentLink1URL: https://www.lcsc.com/product-detail/Crystals_Yangxing-Tech-X322516MOB4SI_C12668.html; LCSC Part Number: C12668; Item Type: Crystal
footprint X322516MOB4SI_ (16MHz SMD Crystal Resonator 12pF)
pins: 1 OSC1, 2 GND, 3 OSC2, 4 GND

## X322524MOB4SI
designator X?, comment 24MHZ
24MHz SMD Crystal Resonator 12pF ±10ppm ±30ppm -40℃~+85℃ SMD3225-4P Crystals ROHS; Manufacturer: Yangxing Tech; Manufacturer Part Number: X322524MOB4SI; ComponentLink1Description: LCSC; ComponentLink1URL: https://www.lcsc.com/product-detail/Crystals_Yangxing-Tech-X322524MOB4SI_C70590.html; Footprint: Custom; LCSC Part Number: C70590; Item Type: Crystal
footprint X322524MOB4SI-
pins: 1 CRYSTAL, 2 GND, 3 CRYSTAL, 4 GND

## X322540MPB4SI
designator X?, comment 40MHz
40MHz SMD Crystal Resonator 15pF SMD3225-4P Crystals ROHS; Manufacturer: Yangxing Tech; Manufacturer Part Number: X322540MPB4SI; Value: 40MHZ; LCSC Part Number: C9010; ComponentLink1Description: LCSC; ComponentLink1URL: https://www.lcsc.com/product-detail/Crystals_Yangxing-Tech-X322540MPB4SI_C9010.html; Item Type: Crystal
footprint X322540MPB4SI_
pins: 1 CRYSTAL, 2 GND, 3 CRYSTAL, 4 GND

## X321532768KGD2SI
designator X?, comment 32.768kHz
32.768kHz SMD Crystal Resonator 12.5pF ±20ppm -40℃~+85℃ SMD3215-2P Crystals ROHS; Manufacturer: Yangxing Tech; Manufacturer Part Number: X321532768KGD2SI; Footprint: Custom; ComponentLink1Description: LCSC; ComponentLink1URL: https://www.lcsc.com/product-detail/Crystals_Yangxing-Tech-X321532768KGD2SI_C620155.html; LCSC Part Number: C620155; Item Type: Crystal
footprint X321532768KGD2SI_
pins: 1 OSC1, 2 OSC2

## X803832768KGD4GI
designator X?, comment 32.768kHz
32.768kHz 12.5pF ±20ppm MC-306 Crystals ROHS; Manufacturer: YXC; Manufacturer Part Number: X803832768KGD4GI; Package: MC-306; LCSC Part Number: C12675; Item Type: Crystal
footprint MC-306
pins: 1 OSC1, 2 GND, 3 GND, 4 OSC2

## XB8886A
designator U?
SOIC-8-EP Battery Management ICs ROHS; Manufacturer: XySemi; Manufacturer Part Number: XB8886A; Item Type: IC; Package: SOIC-8-EP; LCSC Part Number: C669690; ComponentLink1Description: LCSC; ComponentLink1URL: https://www.lcsc.com/product-detail/Battery-Management-ICs_XySemi-XB8886A_C669690.html
footprint 8-SO-EP_
pins: 1 VM, 2 VM, 3 VM, 4 VM, 5 GND, 6 VDD, 7 GND, 8 GND, 9 GND

## XB8889A
designator U?
One Cell Lithium-ion/Polymer Battery Protection IC; Manufacturer: Xysemi; Manufacturer Part Number: XB8889A; Package: SOP 8-EPAD
footprint 8-SO-EP_
pins: 1 VM, 2 VM, 3 VM, 4 VM, 5 GND, 6 VDD, 7 GND, 8 GND, 9 GND

## XC32M4-32.000-F12NLDT
designator X?, comment 32MHz
32MHz SMD Crystal Resonator 12pF 40Ω ±10ppm ±20ppm -40℃~+85℃ SMD3225-4P Crystals ROHS; Manufacturer: HCI; Manufacturer Part Number: XC32M4-32.000-F12NLDT; Footprint: Custom; LCSC Part Number: C2905357; Item Type: Crystal; ComponentLink1Description: LCSC; ComponentLink1URL: https://www.lcsc.com/product-detail/Crystals_HCI-XC32M4-32-000-F12NLDT_C2905357.html
footprint XC32M4-32.000-F12NLDT_
pins: 1 OSC1, 2 GND, 3 OSC2, 4 GND

## XC6210B332MR
designator U?
SOT-23-5 Linear Voltage Regulators (LDO) ROHS; Manufacturer: TECH PUBLIC; Manufacturer Part Number: XC6210B332MR; Item Type: IC; Package: SOT-23-5; LCSC Part Number: C3021084; ComponentLink1Description: LCSC; ComponentLink1URL: https://www.lcsc.com/product-detail/Linear-Voltage-Regulators-LDO_TECH-PUBLIC-XC6210B332MR_C3021084.html
footprint Sot-23-5
pins: 1 VIN, 2 GND, 3 CE, 4 NC, 5 OUT

## XC6220B331MR-G
designator U?
Linear Voltage Regulator IC Positive Fixed 1 Output 3.3V 1A SOT-25; Manufacturer: Torex; Manufacturer Part Number: XC6220B331MR-G; Dropout Voltage: 655mV; Min Input Voltage: 1.6V; Max Input Voltage: 6V; Number of Regulators: 1; Min Current Limit: 1.005A; Supplier 1: Newark; RoHS: Yes; Category: Voltage Regulators - Linear; Stock 1: 3078; Pricing 1: 1=1.20000, 10=1.08000, 100=0.83900, 500=0.69300, 1000=0.54800 (USD); Mount: Surface Mount; Case/Package: SOT-25; Number of Pins: 5; Min Operating Temperature: -40°C; Max Operating Temperature: 85°C; Package Quantity: 1; Packaging: Tape and Reel; Output Current: 1A; Output Voltage: 3.3V; Nominal Output Voltage: 3.3V; Output Type: Fixed; Series: -; REACH SVHC: No SVHC; RoHS Compliant: Yes; ComponentLink1URL: https://datasheet.ciiva.com/7992/610888-7992813.pdf?src-supplier=Element14; ComponentLink1Description: https://datasheet.ciiva.com/7992/610888-7992813.pdf?src-supplier=Element14; ComponentLink2URL: https://datasheet.ciiva.com/5755/610888-5755886.pdf?src-supplier=Farnell; ComponentLink2Description: https://datasheet.ciiva.com/5755/610888-5755886.pdf?src-supplier=Farnell; ComponentLink3URL: https://datasheet.ciiva.com/2040/xc6220-2040201.pdf?src-supplier=Digi-Key; ComponentLink3Description: https://datasheet.ciiva.com/2040/xc6220-2040201.pdf?src-supplier=Digi-Key; ComponentLink4URL: https://datasheet.ciiva.com/2040/xc6220-2040200.pdf?src-supplier=Digi-Key; ComponentLink4Description: https://datasheet.ciiva.com/2040/xc6220-2040200.pdf?src-supplier=Digi-Key; ComponentLink5URL: https://datasheet.ciiva.com/2040/xc6220-2040202.pdf?src-supplier=Digi-Key; ComponentLink5Description: https://datasheet.ciiva.com/2040/xc6220-2040202.pdf?src-supplier=Digi-Key; Supplier Part Number 1: 84R0738; LCSC Part Number: C86534; Item Type: IC
footprint SOT-25-5
pins: 1 VIN, 2 VSS, 3 CE, 4 NC, 5 VOUT

## XC6228D182VR-G
designator U?
300mA 80dB@(1kHz) 410mV@(300mA) Fixed 1.8V~1.8V Positive 1 5.5V SOT-25-5 Linear Voltage Regulators (LDO) ROHS; Manufacturer: Torex Semicon; Manufacturer Part Number: XC6228D182VR-G; Item Type: IC; Package: SOT-25-5; LCSC Part Number: C216644; ComponentLink1Description: LCSC; ComponentLink1URL: https://www.lcsc.com/product-detail/Linear-Voltage-Regulators-LDO_Torex-Semicon-XC6228D182VR-G_C216644.html
footprint SOT-25-5
pins: 1 VIN, 2 GND, 3 CE, 4 NC, 5 OUT

## XC6228D332VR-G
designator U?
300mA 80dB@(1kHz) 305mV@(300mA) Fixed 3.3V~3.3V Positive 1 5.5V SOT-25-5 Linear Voltage Regulators (LDO) ROHS; Manufacturer: Torex Semicon; Manufacturer Part Number: XC6228D332VR-G; Item Type: IC; Package: SOT-25-5; LCSC Part Number: C69841; ComponentLink1Description: LCSC; ComponentLink1URL: https://www.lcsc.com/product-detail/Linear-Voltage-Regulators-LDO_Torex-Semicon-XC6228D332VR-G_C69841.html
footprint SOT-25-5
pins: 1 VIN, 2 GND, 3 CE, 4 NC, 5 OUT

## XKNANO-113
designator J?
Copper Alloy Self bomb Gold plating 1.25mm Deck -40℃~+85℃ 260℃ NanoSIM SMD SIM Card Connectors ROHS; Manufacturer: XKB Connectivity; Manufacturer Part Number: XKNANO-113; Package: SMD Custom; LCSC Part Number: C381071; Item Type: SIM Card Connectors; ComponentLink1Description: LCSC; ComponentLink1URL: https://www.lcsc.com/product-detail/SIM-Card-Connectors_XKB-Connectivity-XKNANO-113_C381071.html
footprint XKNANO-113
pins: 1 Shell, 2 Shell, 3 Shell, 4 Shell, C1 VCC, C2 RST, C3 CLK, C5 GND, C6 VPP, C7 I/O, CD

## XL2596S-5.0E1
designator U?
Step-down type 5V 3A 4.5V~40V TO-263-5 DC-DC Converters ROHS; Manufacturer: XLSEMI; Manufacturer Part Number: XL2596S-5.0E1; Item Type: IC; Package: TO-263-5; LCSC Part Number: C74190; ComponentLink1Description: LCSC; ComponentLink1URL: https://www.lcsc.com/product-detail/DC-DC-Converters_XLSEMI-XL2596S-5-0E1_C74190.html
footprint TO-263-5 (D2PAK)
pins: 1 VIN, 2 OUTPUT, 3 GND, 4 FEEDBACK, 5 ON/OFF , 6 GND

## XL6008E1
designator U?
Buck-boost type 3.6V~32V 3A TO-252-5 DC-DC Converters ROHS; Manufacturer: XLSEMI; Manufacturer Part Number: XL6008E1; Item Type: IC; Package: TO-252-5; LCSC Part Number: C73012; ComponentLink1Description: LCSC; ComponentLink1URL: https://www.lcsc.com/product-detail/DC-DC-Converters_XLSEMI-XL6008E1_C73012.html
footprint TO-252-5
pins: 1 GND, 2 EN, 3 SW, 4 VIN, 5 FB, 6 SW

## XL6019E1
designator U?
NO boost converterType 1 Boost 60V 5V~40V 5A 220kHz TO-263-5 DC-DC Converters ROHS; Manufacturer: XLSEMI; Manufacturer Part Number: XL6019E1; Item Type: IC; Package: TO-263-5; LCSC Part Number: C73018; ComponentLink1Description: LCSC; ComponentLink1URL: https://www.lcsc.com/product-detail/DC-DC-Converters_XLSEMI-XL6019E1_C73018.html
footprint TO-263-5 (D2PAK)
pins: 1 GND, 2 EN, 3 SW, 4 VIN, 5 FB, 6 SW

## XL9535
designator U?
TSSOP-24 I/O Expanders ROHS; Manufacturer: XINLUDA; Manufacturer Part Number: XL9535; Item Type: IC; Package: TSSOP-24; LCSC Part Number: C561273; ComponentLink1Description: LCSC; ComponentLink1URL: https://www.lcsc.com/product-detail/I-O-Expanders_XINLUDA-XL9535_C561273.html
footprint TSSOP_24
pins: 1 ~{INT}, 2 A1, 3 A2, 4 P00, 5 P01, 6 P02, 7 P03, 8 P04, 9 P05, 10 P06, 11 P07, 12 GND, 13 P10, 14 P11, 15 P12, 16 P13, 17 P14, 18 P15, 19 P16, 20 P17, 21 A0, 22 SCL, 23 SDA, 24 VCC

## XL-1010RGBC-WS2812B
designator LED?
Colorless transparence -40℃~+150℃ 正贴 RGB 120° 1010 Light Emitting Diodes (LED) ROHS; Manufacturer: XINGLIGHT; Manufacturer Part Number: XL-1010RGBC-WS2812B; Item Type: RGB LED; Package: 1010; LCSC Part Number: C5349953; ComponentLink1Description: LCSC; ComponentLink1URL: https://www.lcsc.com/product-detail/Light-Emitting-Diodes-LED_XINGLIGHT-XL-1010RGBC-WS2812B_C5349953.html
footprint XL-1010RGBC-WS2812B
pins: 1 DO, 2 VDD, 3 GND, 4 DI

## XM25QH128AHIG
designator U?
20年 2.7V~3.6V -40℃~+85℃ 20uA 15mA 9mA 14mA 128Mbit SPI 0.5ms 104MHz 300ms SOP-8L NOR FLASH ROHS; Manufacturer: XMC; Manufacturer Part Number: XM25QH128AHIG; Item Type: IC; ComponentLink1Description: LCSC; ComponentLink1URL: https://lcsc.com/product-detail/NOR-FLASH_XMC-XM25QH128AHIG_C328463.html; Footprint: SOP-8L; LCSC Part Number: C328463
footprint SOP-8 (208 Mil)
pins: 1 CS#, 2 DO (DQ1), 3 WP# (DQ2), 4 VSS, 5 DI (DQ0), 6 CLK, 7 HOLD#/RESET# (DQ3) , 8 VCC

## XM25QH128CHIQ
designator U?
3V 128M-BIT SERIAL FLASH MEMORY WITH DUAL/QUAD SPI & QPI; Manufacturer: XMC; Manufacturer Part Number: XM25QH128C; Item Type: IC; Footprint: SOP-8L; ComponentLink1Description: XMC; ComponentLink1URL: https://www.xmcwh.com/en/site/product_con/202
footprint SOP-8 (208 Mil)
pins: 1 ~{CS}, 2 DO (IO1), 3 ~{WP(IO2)}, 4 VSS, 5 DI (IO0), 6 CLK, 7 ~{HOLD}(~{IO3)} , 8 VCC

## XT25F128BWOIGT
designator U?
WSON-8(6x5) NOR FLASH ROHS; Manufacturer: XTX; Manufacturer Part Number: XT25F128BWOIGT; Item Type: IC; Package: WSON-8(6x5); LCSC Part Number: C558846; ComponentLink1Description: LCSC; ComponentLink1URL: https://www.lcsc.com/product-detail/NOR-FLASH_XTX-XT25F128BWOIGT_C558846.html
footprint WSON-8(6x5)
pins: 1 CS#, 2 SO(IO1), 3 WP#(IO2), 4 VSS, 5 SI(IO0), 6 SCLK, 7 HOLD#(IO3), 8 VCC

## XXDCCLNANF-8.000000MHZ
designator X?, comment 8.000000MHZ
12pF -40℃~85℃ 贴片无源晶振 ±20ppm 8000000Hz SMD3225-4P Crystals ROHS; Manufacturer Part Number: XXDCCLNANF-8.000000MHZ; Manufacturer: TAITIEN Elec; Package: Custom; Value: 8.000000MHZ; ComponentLink1Description: LCSC; ComponentLink1URL: https://www.lcsc.com/product-detail/Crystals_TAITIEN-Elec-XXDCCLNANF-8-000000MHZ_C521664.html; LCSC Part Number: C521664; Item Type: Crystal
footprint XXDCCLNANF-8.000000MHZ_
pins: 1 OSC1, 2 GND, 3 OSC2, 4 GND

## XZCBD68W-2
designator LED?, comment Blue
LED BLUE CLEAR 2SMD; Manufacturer: SunLED; Manufacturer Part Number: XZCBD68W-2; Lens Color: Colorless; Luminous Intensity: 59mcd; Test Current: 20mA; Viewing Angle: 120°; Dominant Wavelength: 465nm; Forward Voltage: 3.3V; Supplier 1: Digi-Key; RoHS: Yes; Category: LEDs; Stock 1: 9545; Pricing 1: 1=0.52000, 10=0.31700, 100=0.18240, 1000=0.14276 (USD); Mount: Surface Mount; Case/Package: 0402; Color: Blue; Packaging: Tape and Reel; Lens Transparency: Clear; Length: 1mm; Width: 0.5mm; Height: 0.5mm; RoHS Compliant: Yes; ComponentLink1URL: http://www.sunledusa.com/products/spec/XZCBD68W-2.pdf?src-supplier=Digi-Key; ComponentLink1Description: http://www.sunledusa.com/products/spec/XZCBD68W-2.pdf?src-supplier=Digi-Key; ComponentLink2URL: https://www.sunledusa.com/products/spec/XZCBD68W-2.pdf?src-supplier=Digi-Key; ComponentLink2Description: https://www.sunledusa.com/products/spec/XZCBD68W-2.pdf?src-supplier=Digi-Key; Supplier Part Number 1: 1497-1392-1-ND; Item Type: LED
footprint LED-0402
pins: 1, 2

## XZMDK68W-2
designator LED?, comment Red
LED RED CLEAR CHIP SMD; Manufacturer: SunLED; Manufacturer Part Number: XZMDK68W-2; Lens Color: Colorless; Luminous Intensity: 69mcd; Test Current: 20mA; Viewing Angle: 120°; Dominant Wavelength: 630nm; Forward Voltage: 1.95V; Supplier 1: Digi-Key; Stock 1: 69539; Pricing 1: 1=0.43, 10=0.306, 100=0.136, 500=0.0952, 1000=0.0782 (USD); Mount: Surface Mount; Case/Package: 0402; Color: Red; Case Code (Metric): 1005; Case Code (Imperial): 0402; Packaging: Tape and Reel; Lens Transparency: Clear; Length: 1mm; Height: 0.6mm; Width: 0.5mm; ComponentLink1URL: http://www.sunledusa.com/products/spec/XZMDK68W-2.pdf?src-supplier=Digi-Key; ComponentLink1Description: http://www.sunledusa.com/products/spec/XZMDK68W-2.pdf?src-supplier=Digi-Key; ComponentLink2URL: https://www.sunledusa.com/products/spec/XZMDK68W-2.pdf?src-supplier=Digi-Key; ComponentLink2Description: https://www.sunledusa.com/products/spec/XZMDK68W-2.pdf?src-supplier=Digi-Key; Supplier Part Number 1: 1497-1174-6-ND; Item Type: LED
footprint LED-0402
pins: 1, 2

## XZMYK68W-2
designator LED?, comment Yellow
LED YELLOW CLEAR CHIP SMD; Manufacturer: SunLED; Manufacturer Part Number: XZMYK68W-2; Lens Color: Colorless; Luminous Intensity: 148mcd; Test Current: 20mA; Viewing Angle: 120°; Dominant Wavelength: 590nm; Forward Voltage: 2V; Supplier 1: Digi-Key; RoHS: Yes; Category: LEDs; Stock 1: 36021; Pricing 1: 1=0.36000, 10=0.28400, 100=0.12770, 500=0.11536, 1000=0.09476 (USD); Mount: Surface Mount; Case/Package: 0402; Color: Yellow; Case Code (Metric): 1005; Case Code (Imperial): 0402; Packaging: Tape and Reel; Lens Transparency: Clear; Length: 1mm; Width: 0.5mm; Height: 0.6mm; RoHS Compliant: Yes; ComponentLink1URL: http://www.sunledusa.com/products/spec/XZMYK68W-2.pdf?src-supplier=Digi-Key; ComponentLink1Description: http://www.sunledusa.com/products/spec/XZMYK68W-2.pdf?src-supplier=Digi-Key; Supplier Part Number 1: 1497-1198-1-ND; Item Type: LED
footprint LED-0402
pins: 1, 2

## XZVG68W-2
designator LED?
LED GREEN CLEAR CHIP SMD; Manufacturer: SunLED; Manufacturer Part Number: XZVG68W-2; Lens Color: Colorless; Luminous Intensity: 49mcd; Test Current: 20mA; Viewing Angle: 120°; Dominant Wavelength: 570nm; Forward Voltage: 2.1V; Supplier 1: Digi-Key; Stock 1: 4185; Pricing 1: 1=0.5, 10=0.36, 100=0.16, 500=0.112, 1000=0.092 (USD); Mount: Surface Mount; Case/Package: 0402; Color: Green; Case Code (Metric): 1005; Case Code (Imperial): 0402; Packaging: Tape and Reel; Lens Transparency: Clear; Length: 1mm; Height: 0.6mm; Width: 0.5mm; ComponentLink1URL: http://www.sunledusa.com/products/spec/XZVG68W-2.pdf?src-supplier=Digi-Key; ComponentLink1Description: http://www.sunledusa.com/products/spec/XZVG68W-2.pdf?src-supplier=Digi-Key; ComponentLink2URL: https://www.sunledusa.com/products/spec/XZVG68W-2.pdf?src-supplier=Digi-Key; ComponentLink2Description: https://www.sunledusa.com/products/spec/XZVG68W-2.pdf?src-supplier=Digi-Key; Supplier Part Number 1: 1497-1219-6-ND; Item Type: LED
footprint LED-0402
pins: 1, 2

## YC164-FR-0710KL
designator RN?, comment 10K
RES ARRAY 4 RES 10K OHM 1206; Manufacturer: Yageo; Manufacturer Part Number: YC164-FR-0710KL; Tolerance: 1%; Voltage Rating: 50V; Number of Elements: 4; Value: 10kR; Circuit Type: Isolated; Power Per Element: 62.5mW; Temperature Coefficient: 200ppm/°C; Item Type: Resistor Array; Supplier 1: Future Electronics; RoHS: Yes; Category: Resistor Arrays; Stock 1: 25000; Pricing 1: 5000=0.0101, 20000=0.0095, 50000=0.0092, 125000=0.0089, 200000=0.0085 (USD); Mounting Technology: Surface Mount; Pins: 8; Case Code (Metric): 3216; Case Code (Imperial): 1206; Min Operating Temperature: -55°C; Max Operating Temperature: 155°C; Packaging: Tape and Reel; Number of Resistors: 4; Number of Circuits: 4; Series: YC164; Resistance Tolerance: 1%; Length: 0.126inch; Width: 0.063inch; Height: 0.028inch; Lead Free: Lead Free; RoHS Compliant: Yes; Reach SVHC Compliant: Unknown; ComponentLink1URL: http://www.farnell.com/datasheets/2167431.pdf?src-supplier=Farnell; ComponentLink1Description: http://www.farnell.com/datasheets/2167431.pdf?src-supplier=Farnell; ComponentLink2URL: https://media.digikey.com/pdf/Data%20Sheets/Yageo%20PDFs/YC102-358,TC122-164_Series_DS.pdf?src-supplier=Digi-Key; ComponentLink2Description: https://media.digikey.com/pdf/Data%20Sheets/Yageo%20PDFs/YC102-358,TC122-164_Series_DS.pdf?src-supplier=Digi-Key; ComponentLink3URL: http://www.farnell.com/datasheets/2167431.pdf?src-supplier=Element14; ComponentLink3Description: http://www.farnell.com/datasheets/2167431.pdf?src-supplier=Element14; ComponentLink4URL: http://www.farnell.com/datasheets/443424.pdf?src-supplier=Element14; ComponentLink4Description: http://www.farnell.com/datasheets/443424.pdf?src-supplier=Element14; ComponentLink5URL: http://www.farnell.com/datasheets/2167431.pdf?src-supplier=Newark; ComponentLink5Description: http://www.farnell.com/datasheets/2167431.pdf?src-supplier=Newark; Supplier Part Number 1: 5054288; LCSC Part Number: C110924
footprint YC164-FR-0710KL
pins: 1, 2, 3, 4, 5, 6, 7, 8

## YC164-FR-0733RL
designator RN?, comment 33R
RES ARRAY 4 RES 33 OHM 1206; Manufacturer: Yageo; Manufacturer Part Number: YC164-FR-0733RL; Tolerance: 1%; Voltage Rating: 50V; Number of Elements: 4; Circuit Type: Isolated; Power Per Element: 62.5mW; Temperature Coefficient: 200ppm/°C; Item Type: Resistor Array; Supplier 1: Arrow Electronics; RoHS: Yes; Category: Resistor Arrays; Stock 1: 30000; Pricing 1: 5000=0.01 (USD); Mounting Technology: Surface Mount; Pins: 8; Case Code (Metric): 3216; Case Code (Imperial): 1206; Min Operating Temperature: -55°C; Max Operating Temperature: 155°C; Value: 33R; Packaging: Tape and Reel; Number of Resistors: 4; Number of Circuits: 4; Series: YC164; Resistance Tolerance: 1%; Length: 0.126inch; Width: 0.063inch; Height: 0.028inch; Radiation Hardening: No; Lead Free: Lead Free; RoHS Compliant: Yes; Reach SVHC Compliant: Unknown; ComponentLink1URL: https://datasheet.ciiva.com/8017/443424-8017949.pdf?src-supplier=Element14; ComponentLink1Description: https://datasheet.ciiva.com/8017/443424-8017949.pdf?src-supplier=Element14; ComponentLink2URL: https://datasheet.ciiva.com/8017/443424-8017948.pdf?src-supplier=Element14; ComponentLink2Description: https://datasheet.ciiva.com/8017/443424-8017948.pdf?src-supplier=Element14; ComponentLink3URL: https://datasheet.ciiva.com/8311/pyu-yc-tc164-51-rohs-l-3-8311992.pdf?src-supplier=Avnet; ComponentLink3Description: https://datasheet.ciiva.com/8311/pyu-yc-tc164-51-rohs-l-3-8311992.pdf?src-supplier=Avnet; Supplier Part Number 1: YC164-FR-0733RL; LCSC Part Number: C309681
footprint YC164-FR-0733RL
pins: 1, 2, 3, 4, 5, 6, 7, 8

## YC164-JR-070RL
designator RN?, comment 0R
4 0Ω 62.5mW ±200ppm/℃ 0603x4 Resistor Networks & Arrays ROHS; Manufacturer: YAGEO; Manufacturer Part Number: YC164-JR-070RL; Item Type: Resistor Array; Package: 0603x4; LCSC Part Number: C327053; ComponentLink1Description: LCSC; ComponentLink1URL: https://www.lcsc.com/product-detail/Resistor-Networks-Arrays_YAGEO-YC164-JR-070RL_C327053.html
footprint YC164-JR-070RL
pins: 1, 2, 3, 4, 5, 6, 7, 8